# Altium schematic symbol library ABM8W-48.0000MHZ-7-B1U-T3.SchLib: 1 symbol
Pins are listed as number, name and electrical type; pins without a type are passive.

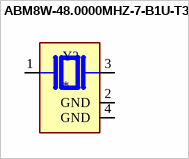
[diagram p0: symbol ABM8W-48.0000MHZ-7-B1U-T3]

## ABM8W-48.0000MHZ-7-B1U-T3
designator Y?
MF: {'manufacturer': u'Abracon LLC'}; MP: ABM8W-48.0000MHZ-7-B1U-T3; Package: None; Price: None; Value: *; Availability: Unavailable
footprint XTAL_ABM8W-48.0000MHZ-7-B1U-T3
pins: 1, 2 GND (power), 3 2, 4 GND (power)